# Altium schematic symbol library PCB_PTUMotorDriver.SCHLIB: 144 symbols (part 3 of 3)
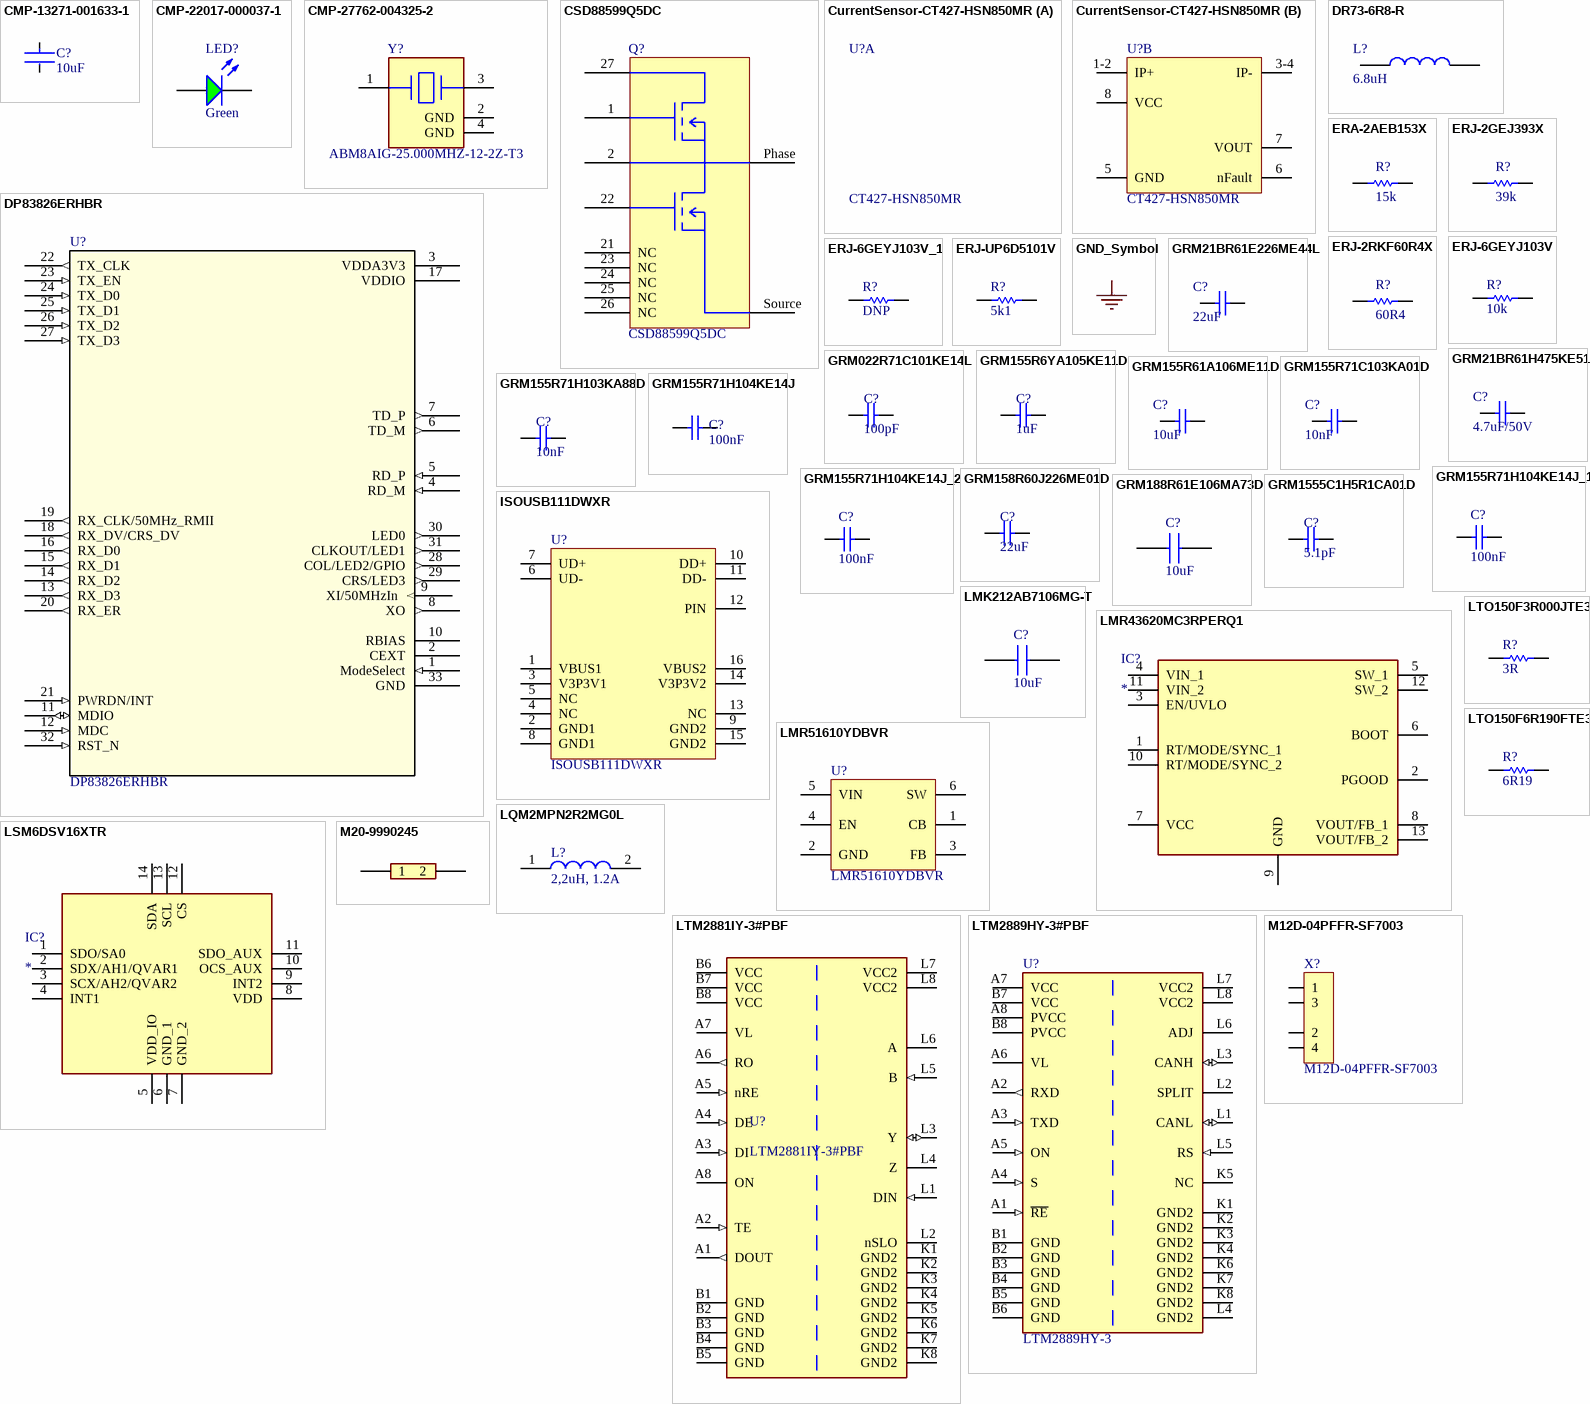
[diagram p5: symbols CMP-13271-001633-1 to M20-9990245]

## LTO150F3R000JTE3
designator R?, comment 3R
Resistor 3R Powerresistor; Manufacturer Part Number: 72-LTO150F3R000JTE3; Supplier 1: Mouser; Supplier 2: Digikey; Supplier Part Number 2: 716-LTO150F3R000JTE3-ND
footprint FP-LTO150-MFG
pins: 1, 2

## LTO150F6R190FTE3
designator R?, comment 6R19
Resistor 3R Powerresistor; Manufacturer Part Number: LTO150F6R190FTE3; Supplier 1: Avnet; Supplier Part Number 1: LTO150F6R190FTE3
footprint FP-LTO150-MFG
pins: 1, 2

## M12D-04PFFR-SF7003
designator X?
Conn Circular F 4 POS Solder RA Panel Mount 4 Terminal 1 Port; Manufacturer: Amphenol; Manufacturer Part Number: M12D-04PFFR-SF7003; RoHS: No; Pricing 1: 10=8.15600 (USD); ComponentLink1URL: http://www.amphenolltw.com/2012download/2D%20PDF/03_M%20Series%20Sensor%20Connectors/M12D-04PFFR-SF7003.pdf?src-supplier=Digi-Key; ComponentLink1Description: http://www.amphenolltw.com/2012download/2D%20PDF/03_M%20Series%20Sensor%20Connectors/M12D-04PFFR-SF7003.pdf?src-supplier=Digi-Key; Supplier 1: Digikey; Supplier Part Number 1: 4995-M12D-04PFFR-SF7003-ND
footprint M12D04PFFRSF7003
pins: 1, 2, 3, 4

## M20-9990245
designator J?  (value not drawn)
2x1 Connector Header; Manufacturer_Name: Harwin; Datasheet Link: https://cdn.harwin.com/pdfs/M20-999.pdf; Height: 8.64mm; Manufacturer Part Number: M20-9990245; Mouser Part Number: 855-M20-9990245; Mouser Price/Stock: https://www.mouser.co.uk/ProductDetail/Harwin/M20-9990245?qs=Jph8NoUxIfUDXEB%252Bi9kJRA%3D%3D; Supplier 1: Digikey; Supplier Part Number 1: 952-2261-ND
footprint HDRV2W64P0X254_1X2_508X254X864P
pins: 1, 2

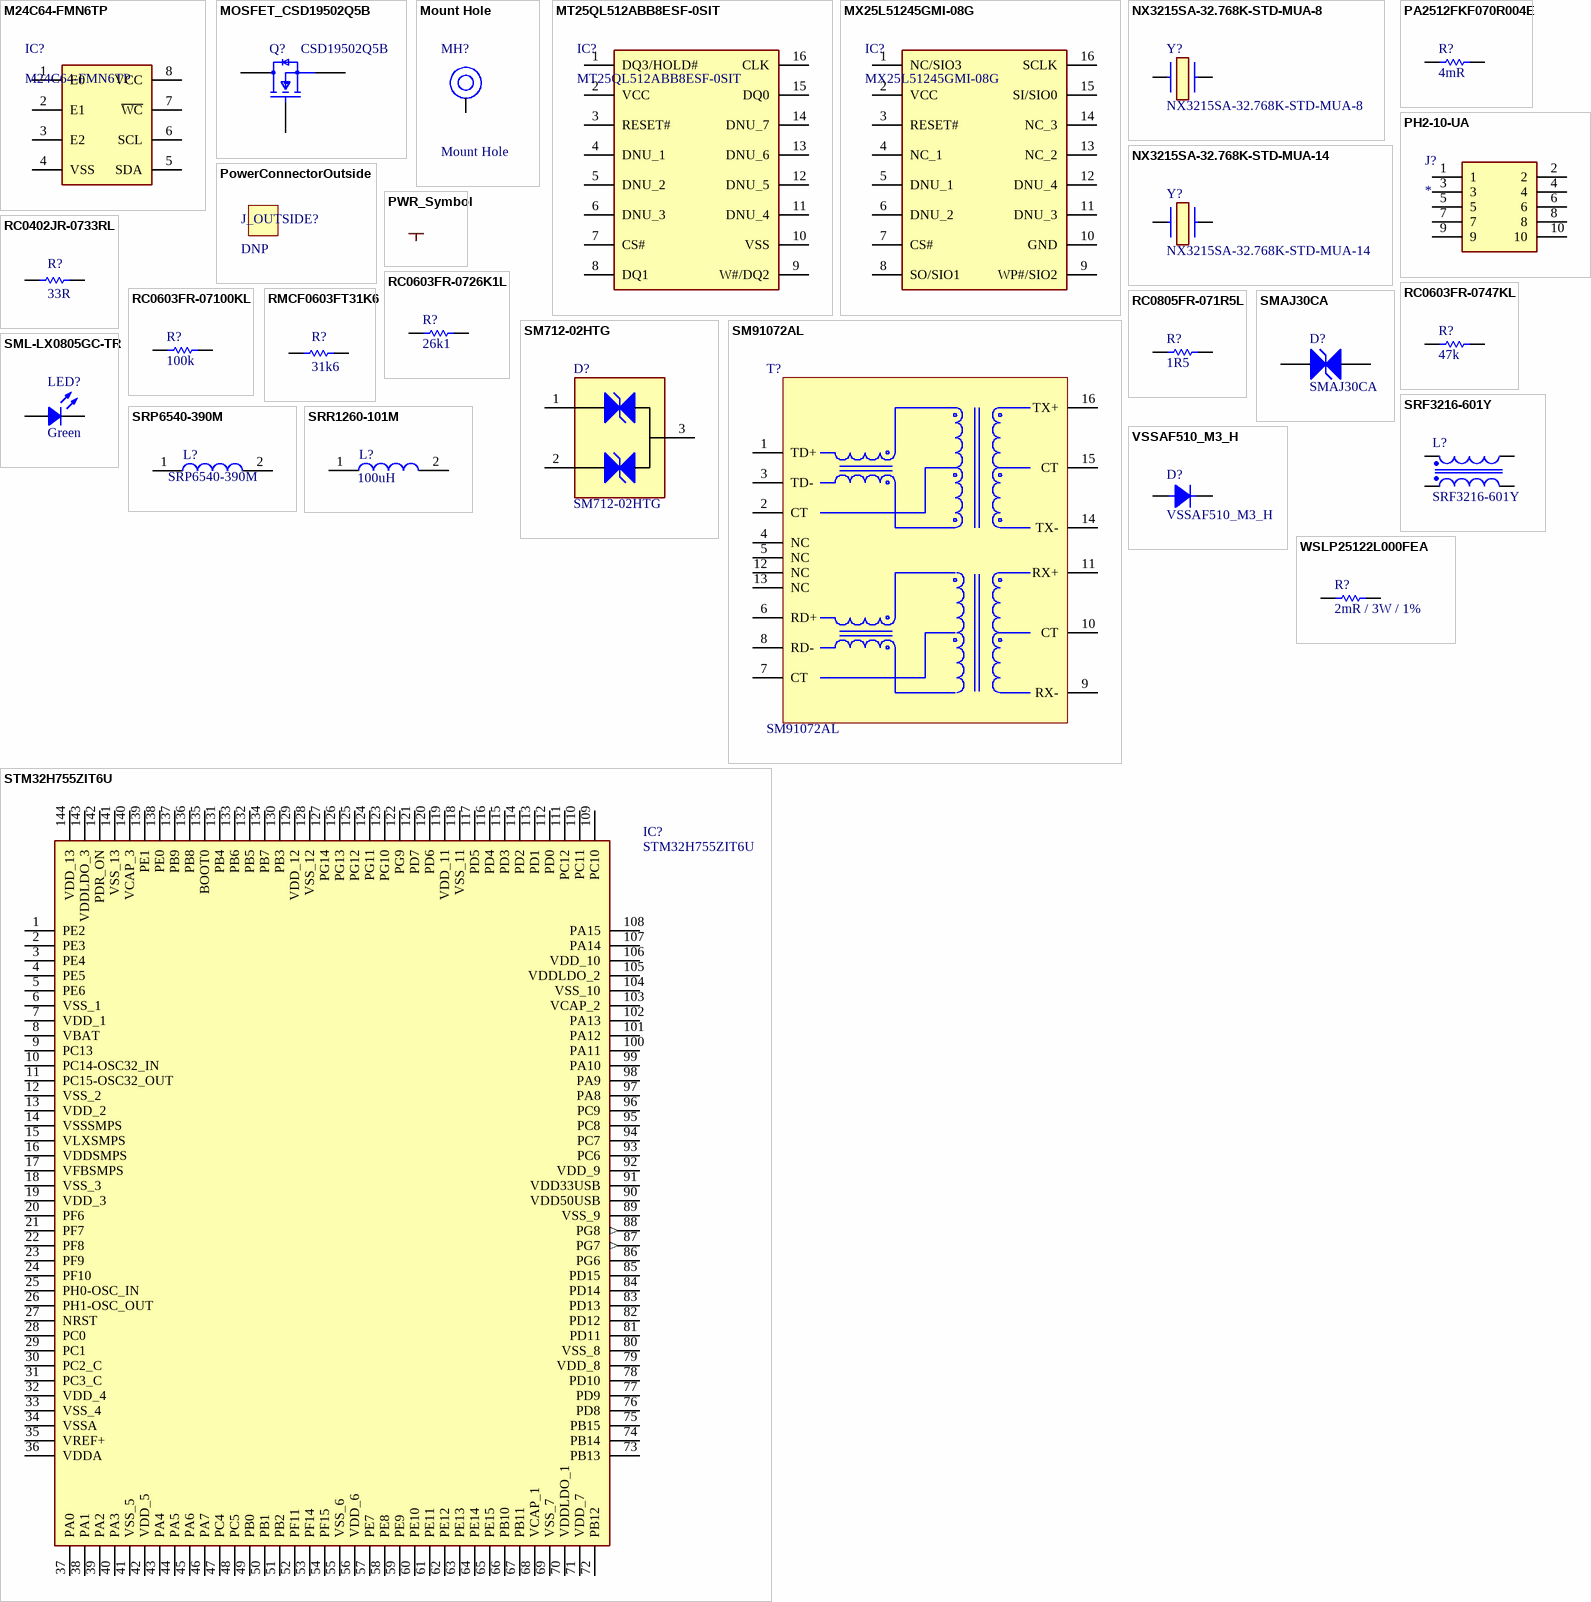
[diagram p3: symbols M24C64-FMN6TP to WSLP25122L000FEA]

## M24C64-FMN6TP
designator IC?
EEPROM ST 64kbit I2C; Manufacturer_Name: STMicroelectronics; Datasheet Link: https://www.st.com/resource/en/datasheet/m24c64-f.pdf; Height: 1.75mm; Manufacturer Part Number: M24C64-FMN6TP; Mouser Part Number: 511-M24C64-FMN6TP; Mouser Price/Stock: https://www.mouser.co.uk/ProductDetail/STMicroelectronics/M24C64-FMN6TP?qs=bKyP%252BnDORLFSmkTpM6wmYg%3D%3D; Arrow Part Number: M24C64-FMN6TP; Arrow Price/Stock: https://www.arrow.com/en/products/m24c64-fmn6tp/stmicroelectronics?utm_currency=USD&region=europe
footprint SOIC127P600X175-8N
pins: 1 E0, 2 E1, 3 E2, 4 VSS, 5 SDA, 6 SCL, 7 ~{WC}, 8 VCC

## MOSFET_CSD19502Q5B
designator Q?, comment CSD19502Q5B
MOSFET N-CH 80V 100A 8SON; Manufacturer Part Number: 595-CSD19502Q5B; Element Configuration: Single; Number of Channels: 1; Fall Time: 7ns; Threshold Voltage: 2.7V; Gate to Source Voltage (Vgs): 20V; Input Capacitance: 4.87nF; Drain to Source Resistance: 3.4mR; Turn-On Delay Time: 8ns; Power Dissipation: 3.2W; Rise Time: 6ns; Turn-Off Delay Time: 22ns; Rds On Max: 4.1mR; Number of Pins: 8; Min Operating Temperature: -55°C; Continuous Drain Current (ID): 100A; Number of Elements: 1; Max Operating Temperature: 150°C; Package Quantity: 2500; Packaging: Tape and Reel; Drain to Source Breakdown Voltage: 80V; RoHS Compliant: Yes; Mount: Surface Mount; Drain to Source Voltage (Vdss): 80V; REACH SVHC: No SVHC; Lead Free: Contains Lead; Max Power Dissipation: 3.2W; Supplier 1: Mouser
footprint FP-DNK0008A-MFG
pins: 1-2-3 S, 4 G, 5-6-7-8 D

## Mount Hole
designator MH?
M3 (3.5mm) hole
footprint MOUNT_HOLE
pins: 1

## MT25QL512ABB8ESF-0SIT
designator IC?
NOR FLASH 512Mbit QSPI; Manufacturer_Name: Micron; Datasheet Link: https://datasheet.datasheetarchive.com/originals/distributors/DKDS42/DSANUWW0045437.pdf; Height: 2.65mm; Manufacturer Part Number: MT25QL512ABB8ESF-0SIT; Mouser Part Number: 340-278183-TRAY; Mouser Price/Stock: https://www.mouser.co.uk/ProductDetail/Micron/MT25QL512ABB8ESF-0SIT?qs=rrS6PyfT74e8sADX0P8kAw%3D%3D; Arrow Part Number: MT25QL512ABB8ESF-0SIT; Arrow Price/Stock: https://www.arrow.com/en/products/mt25ql512abb8esf-0sit/micron-technology?utm_currency=USD&region=nac
footprint SOIC127P1032X265-16N
pins: 1 DQ3/HOLD#, 2 VCC, 3 RESET#, 4 DNU_1, 5 DNU_2, 6 DNU_3, 7 CS#, 8 DQ1, 9 W#/DQ2, 10 VSS, 11 DNU_4, 12 DNU_5, 13 DNU_6, 14 DNU_7, 15 DQ0, 16 CLK

## MX25L51245GMI-08G
designator IC?
NOR Flahs 512MBit QSPI Macronix; Datasheet Link: https://datasheet.datasheetarchive.com/originals/dk/DKDS-14/274585.pdf; Height: 2.65mm; Manufacturer_Name: Macronix; Manufacturer Part Number: MX25L51245GMI-08G; Arrow Part Number: MX25L51245GMI-08G; Arrow Price/Stock: https://www.arrow.com/en/products/mx25l51245gmi-08g/macronix-international?region=nac
footprint SOIC127P1030X265-16N
pins: 1 NC/SIO3, 2 VCC, 3 RESET#, 4 NC_1, 5 DNU_1, 6 DNU_2, 7 CS#, 8 SO/SIO1, 9 WP#/SIO2, 10 GND, 11 DNU_3, 12 DNU_4, 13 NC_2, 14 NC_3, 15 SI/SIO0, 16 SCLK

## NX3215SA-32.768K-STD-MUA-8
designator Y?
Crystal or Oscillator; Manufacturer_Name: NDK; Datasheet Link: https://www.arrow.com/en/products/nx3215sa32.768kstdmua8/ndk; Height: 0.9mm; Manufacturer Part Number: NX3215SA-32.768K-STD-MUA-8; Mouser Part Number: 344-NX3215SA32768K8; Mouser Price/Stock: https://www.mouser.co.uk/ProductDetail/NDK/NX3215SA-32.768K-STD-MUA-8?qs=55YtniHzbhBdnrw6egvs7Q%3D%3D; Arrow Part Number: NX3215SA-32.768K-STD-MUA-8; Arrow Price/Stock: https://www.arrow.com/en/products/nx3215sa32.768kstdmua8/ndk; Supplier 1: Mouser; Supplier Part Number 1: 344-NX3215SA32768K8
footprint NX3215SA32768KSTDMUA8
pins: 1, 2 CRYSTAL_2

## NX3215SA-32.768K-STD-MUA-14
designator Y?
Crystal or Oscillator - 6pF Load; Manufacturer_Name: NDK; Datasheet Link: https://www.arrow.com/en/products/nx3215sa32.768kstdmua8/ndk; Height: 0.9mm; Manufacturer Part Number: NX3215SA-32.768K-STD-MUA-14; Mouser Part Number: 344-NX3215SA32768K8; Mouser Price/Stock: https://www.mouser.co.uk/ProductDetail/NDK/NX3215SA-32.768K-STD-MUA-8?qs=55YtniHzbhBdnrw6egvs7Q%3D%3D; Arrow Part Number: NX3215SA-32.768K-STD-MUA-8; Arrow Price/Stock: https://www.arrow.com/en/products/nx3215sa32.768kstdmua8/ndk; Supplier 1: Mouser; Supplier Part Number 1: 344-NX3215SA32768K8
footprint NX3215SA32768KSTDMUA8
pins: 1, 2 CRYSTAL_2

## PA2512FKF070R004E
designator R?, comment 4mR
Resistor 4mR Measurement resistor; Manufacturer: Yageo; Manufacturer Part Number: PA2512FKF070R004E; Tolerance: 1%; Power: 1W; Rated Temperature: 70°C; Temperature Coefficient (ppm/Cel): 100; Package Height: 0.63mm; Package Length: 6.35mm; Package Width: 3.18mm; Reference Standard: AEC-Q200; Supplier: Digikey; Supplier Part Number: YAG2139CT-ND; RoHS: Yes; Category: Chip SMD Resistors; Stock: 13389; Pricing: 1=0.6, 10=0.387, 25=0.3288, 50=0.2926, 100=0.2616, 250=0.2276, 500=0.20634, 1000=0.18827 (USD); Mounting Technology: Surface Mount; Pins: 2; Package Shape: Rectangular; Case/Package: 2512; Terminal Finish: Nickel; Min Operating Temperature: -55°C; Max Operating Temperature: 170°C; JESD-609 Code: e3; Resistor Type: FIXED RESISTOR; Construction: Chip; Packaging: Tape and Reel; Value: 4mR; Technology: METAL ALLOY; Termination: Wraparound; Reach SVHC Compliant: Yes; RoHS Compliant: Yes; ComponentLink1URL: https://datasheet.ciiva.com:443/pdfs/VipMasterIC/IC/YAGO/YAGO-S-A0001793180/YAGO-S-A0001793180-1.pdf?src-supplier=IHS+Markit; ComponentLink1Description: https://datasheet.ciiva.com:443/pdfs/VipMasterIC/IC/YAGO/YAGO-S-A0001793180/YAGO-S-A0001793180-1.pdf?src-supplier=IHS+Markit; ComponentLink2URL: http://www.mouser.com/ds/2/447/PYu-PA_E_51_RoHS_5-1077983.pdf?src-supplier=Mouser; ComponentLink2Description: http://www.mouser.com/ds/2/447/PYu-PA_E_51_RoHS_5-1077983.pdf?src-supplier=Mouser; ComponentLink3URL: http://www.yageo.com/documents/recent/PYu-PA_E_51_RoHS_6.pdf?src-supplier=Digikey; ComponentLink3Description: http://www.yageo.com/documents/recent/PYu-PA_E_51_RoHS_6.pdf?src-supplier=Digikey; ComponentLink4URL: http://www.yageo.com/documents/recent/PYu-PA_E_51_RoHS_10.pdf?src-supplier=Digikey; ComponentLink4Description: http://www.yageo.com/documents/recent/PYu-PA_E_51_RoHS_10.pdf?src-supplier=Digikey; Supplier 1: Digikey; Supplier Part Number 1: YAG2139CT-ND
footprint RESC6331X88N
pins: 1, 2

## PH2-10-UA
designator J?
Connector 10pos; Manufacturer_Name: Adam Tech; Manufacturer Part Number: PH2-10-UA; Datasheet Link: https://datasheet.datasheetarchive.com/originals/distributors/Datasheets_SAMA/c63e3fe101e7b6e3957e7ad4a1a98367.pdf; Height: 9.516mm; Arrow Part Number: PH2-10-UA; Arrow Price/Stock: https://www.arrow.com/en/products/ph2-10-ua/adam-tech?utm_currency=USD&region=europe
footprint HDRV10W64P254_2X5_1270X500X952P
pins: 1, 2, 3, 4, 5, 6, 7, 8, 9, 10

## PowerConnectorOutside
designator J_OUTSIDE?, comment DNP
Waterresistant power connector e
footprint Powerconnector

## PWR_Symbol
designator *  (value not drawn)  (graphical)

## RC0402JR-0733RL
designator R?, comment 33R
Resistor 33R 0402; Manufacturer_Name: KEMET; Manufacturer Part Number: RC0402JR-0733RL; Datasheet Link: http://www.yageo.com/documents/recent/PYu-RC0402_51_RoHS_L_6_r.pdf; Height: 0.4mm; Mouser Part Number: 603-RC0402JR-0733RL; Mouser Price/Stock: https://www.mouser.com/Search/Refine.aspx?Keyword=603-RC0402JR-0733RL; Arrow Part Number: RC0402JR-0733RL; Arrow Price/Stock: https://www.arrow.com/en/products/rc0402jr-0733rl/yageo
footprint RESC1005X40N
pins: 1, 2

## RC0603FR-0726K1L
designator R?, comment 26k1
Resistor 26k1 0603; Mfr_Name: Yageo; Manufacturer Part Number: 603-RC0603FR-0726K1L; Supplier 1: Mouser
footprint RC0603N_YAG
pins: 1, 2

## RC0603FR-0747KL
designator R?, comment 47k
Resistor 47k 0603; Manufacturer_Name: KEMET; Manufacturer Part Number: RC0603FR-0747KL; Datasheet Link: http://www.yageo.com/documents/recent/PYu-RC0603_51_RoHS_L_v5.pdf; Height: 0.55mm; Mouser Part Number: 603-RC0603FR-0747KL; Mouser Price/Stock: https://www.mouser.co.uk/ProductDetail/YAGEO/RC0603FR-0747KL?qs=gt6vzsuosg3jXzmCiDCCdg%3D%3D; Arrow Part Number: RC0603FR-0747KL; Arrow Price/Stock: https://www.arrow.com/en/products/rc0603fr-0747kl/yageo?region=nac; Supplier 1: Digikey; Supplier Part Number 1: 311-47.0KHRCT-ND; Supplier 2: Digikey; Supplier Part Number 2: 311-47.0KHRDKR-ND
footprint RESC1608X55N
pins: 1, 2

## RC0603FR-07100KL
designator R?, comment 100k
Resistor 100k 0603; Manufacturer_Name: YAGEO; Manufacturer Part Number: RC0603FR-07100KL; Datasheet Link: https://www.yageo.com/upload/media/product/productsearch/datasheet/rchip/PYu-RC_Group_51_RoHS_L_12.pdf; Height: 0.55mm; Mouser Part Number: 603-RC0603FR-07100KL; Mouser Price/Stock: https://www.mouser.co.uk/ProductDetail/YAGEO/RC0603FR-07100KL?qs=e1ok2LiJcmaihem8Va5%2Fsw%3D%3D; Arrow Part Number: RC0603FR-07100KL; Arrow Price/Stock: https://www.arrow.com/en/products/rc0603fr-07100kl/yageo?utm_currency=USD&region=nac; Supplier 1: Digikey; Supplier Part Number 1: 311-100KHRCT-ND
footprint RESC1608X55N
pins: 1, 2

## RC0805FR-071R5L
designator R?, comment 1R5
Resistor 1R5 0805; Manufacturer_Name: KEMET; Manufacturer Part Number: RC0805FR-071R5L; Datasheet Link: http://www.yageo.com/documents/recent/PYu-RC_Group_51_RoHS_L_10.pdf; Height: 0.6mm; Mouser Part Number: 603-RC0805FR-071R5L; Mouser Price/Stock: https://www.mouser.com/Search/Refine.aspx?Keyword=603-RC0805FR-071R5L; Supplier 1: Digikey; Supplier Part Number 1: 311-1.50CRCT-ND
footprint RESC2012X60N
pins: 1, 2

## RMCF0603FT31K6
designator R?, comment 31k6
Resistor 31k6 0603; Manufacturer_Name: Stackpole Electronics; Manufacturer Part Number: RMCF0603FT31K6; Datasheet Link: https://www.seielect.com/Catalog/SEI-RMCF_RMCP.pdf; Height: 0.55mm; Arrow Part Number: RMCF0603FT31K6; Arrow Price/Stock: https://www.arrow.com/en/products/rmcf0603ft31k6/stackpole-electronics?region=nac
footprint RESC1608X55N
pins: 1, 2

## SM712-02HTG
designator D?
TVS Diode (Bi-directional); Manufacturer_Name: LITTELFUSE; Datasheet Link: https://www.littelfuse.com/media?resourcetype=datasheets&itemid=a4019802-ff62-41ff-bf66-295f97422f81&filename=littelfuse-tvs-diode-array-sm712-datasheet; Height: 1.12mm; Manufacturer Part Number: SM712-02HTG; Mouser Part Number: 576-SM712-02HTG; Mouser Price/Stock: https://www.mouser.co.uk/ProductDetail/Littelfuse/SM712-02HTG?qs=aGgfWYEhH7lQgBVBPCUDkw%3D%3D; Arrow Part Number: SM712-02HTG; Arrow Price/Stock: https://www.arrow.com/en/products/sm712-02htg/littelfuse?utm_currency=USD&region=nac; Supplier 1: Digikey; Supplier Part Number 1: F6450CT-ND
footprint SM71202HTG
pins: 1, 2, 3

## SM91072AL
designator T?
Telecom Transformer 1: 1 1.4Ohm Prim. DCR 1Ohm Sec. DCR 16 Terminal Gull Wing SMD Automotive; Manufacturer: Bourns; Value: 350uH; Turns Ratio: 1:1; ComponentLink1URL: http://www.farnell.com/datasheets/2169310.pdf?src-supplier=Farnell; ComponentLink1Description: http://www.farnell.com/datasheets/2169310.pdf?src-supplier=Farnell; ComponentLink2URL: https://www.bourns.com/docs/Product-Datasheets/sm13072apel.pdf?src-supplier=Digi-Key; ComponentLink2Description: https://www.bourns.com/docs/Product-Datasheets/sm13072apel.pdf?src-supplier=Digi-Key; ComponentLink3URL: http://www.farnell.com/datasheets/2169310.pdf?src-supplier=Newark; ComponentLink3Description: http://www.farnell.com/datasheets/2169310.pdf?src-supplier=Newark; Supplier: Digikey; Supplier Part Number: 118-SM91072AL-ECT-ND; Manufacturer Part Number: SM91072AL; RoHS: Yes; Category: Uncategorized; Stock: 2173; Pricing: 1=4.72, 10=3.828, 25=3.0952, 50=2.8998, 100=2.7695, 250=2.68808 (USD); Mounting Technology: Surface Mount; Min Operating Temperature: -40°C; Max Operating Temperature: 125°C; Series: Automotive, AEC-Q200, SM; Supplier 1: Digikey; Supplier Part Number 1: 118-SM91072AL-ECT-ND
footprint SOIC127P950X590-16N
pins: 1 TD+, 2 CT, 3 TD-, 4 NC, 5 NC, 6 RD+, 7 CT, 8 RD-, 9 RX-, 10 CT, 11 RX+, 12 NC, 13 NC, 14 TX-, 15 CT, 16 TX+

## SMAJ30CA
designator D?
LITTELFUSE - SMAJ30CA - TVS DIODE, 400W, 30V, DO-214AC; Manufacturer: Littelfuse Inc.; Clamping Voltage: 48.4V; Polarity: Bidirectional; Peak Pulse Current: 8.3A; Test Current: 1mA; Reverse Breakdown Voltage: 33.3V; Number of Elements: 1; Leakage Current: 1uA; Element Configuration: Single; Power Line Protection: No; Max Power Dissipation: 3.3W; Max Breakdown Voltage: 36.8V; Manufacturer Part Number: SMAJ30CA; Value: *; Supplier 1: Digi-Key; Stock 1: 28360; Pricing 1: 1=0.45000, 10=0.33900, 25=0.30520, 100=0.16100, 250=0.15928, 500=0.14264, 1000=0.11100, 2500=0.10156 (USD); RoHS: Yes; Mount: Surface Mount; Number of Pins: 2; Min Operating Temperature: -65°C; Max Operating Temperature: 150°C; Peak Pulse Power: 400W; Packaging: Tape and Reel; Reverse Standoff Voltage: 30V; Breakdown Voltage: 33.3V; Package Quantity: 5000; Max Surge Current: 8.3A; Operating Supply Voltage: 30V; Min Breakdown Voltage: 33.3V; Number of Channels: 1; Direction: Bidirectional; Termination: SMD/SMT; Max Reverse Leakage Current: 1uA; Number of Bidirectional Channels: 1; Composition: Zener; Power Dissipation: 400W; Voltage Rating (DC): 30V; Length: 4.5mm; Height: 2.087mm; Width: 2.79mm; Radiation Hardening: No; Lead Free: Lead Free; REACH SVHC: No SVHC; ComponentLink1URL: https://datasheet.ciiva.com/25624/0900766b810f4edb-25624835.pdf?src-supplier=RSComponents; ComponentLink1Description: https://datasheet.ciiva.com/25624/0900766b810f4edb-25624835.pdf?src-supplier=RSComponents; ComponentLink2URL: https://datasheet.ciiva.com/331/littelfuse-tvs-diode-smaj-datasheet-pdf-331093.pdf?src-supplier=Digi-Key; ComponentLink2Description: https://datasheet.ciiva.com/331/littelfuse-tvs-diode-smaj-datasheet-pdf-331093.pdf?src-supplier=Digi-Key; ComponentLink3URL: https://datasheet.ciiva.com/28473/607617-28473413.pdf?src-supplier=Element14; ComponentLink3Description: https://datasheet.ciiva.com/28473/607617-28473413.pdf?src-supplier=Element14; ComponentLink4URL: https://datasheet.ciiva.com/331/littelfuse-tvs-diode-smaj-datasheet-pdf-331094.pdf?src-supplier=Digi-Key; ComponentLink4Description: https://datasheet.ciiva.com/331/littelfuse-tvs-diode-smaj-datasheet-pdf-331094.pdf?src-supplier=Digi-Key; ComponentLink5URL: https://datasheet.ciiva.com/331/littelfuse-tvs-diode-smaj-datasheet-pdf-331095.pdf?src-supplier=Digi-Key; ComponentLink5Description: https://datasheet.ciiva.com/331/littelfuse-tvs-diode-smaj-datasheet-pdf-331095.pdf?src-supplier=Digi-Key; ComponentLink6URL: https://datasheet.ciiva.com/14162/smaj-eng-ds-14162037.pdf?src-supplier=Distrelec; ComponentLink6Description: https://datasheet.ciiva.com/14162/smaj-eng-ds-14162037.pdf?src-supplier=Distrelec; ComponentLink7URL: https://datasheet.ciiva.com/16487/littelfuse-tvs-diode-smaj-16487781.pdf?src-supplier=Future+Electronics; ComponentLink7Description: https://datasheet.ciiva.com/16487/littelfuse-tvs-diode-smaj-16487781.pdf?src-supplier=Future+Electronics; ComponentLink8URL: https://datasheet.ciiva.com/8062/littelfuse-tvs-diode-smaj-8062300.pdf?src-supplier=Element14; ComponentLink8Description: https://datasheet.ciiva.com/8062/littelfuse-tvs-diode-smaj-8062300.pdf?src-supplier=Element14; Supplier Part Number 1: SMAJ30CALFCT-ND
footprint DO-214AC-M (DO-214AC-Medium density)
pins: 1, 2

## SML-LX0805GC-TR
designator LED?, comment Green
LED GREEN CLEAR SMD; Manufacturer: Lumex Opto/Components Inc.; Manufacturer Part Number: SML-LX0805GC-TR; Configuration: Standard; Current - Test: 20mA; Lens Color: Colorless; Lens Size: 1.40mm x 1.25mm; Lens Style: Rectangle with Flat Top; Millicandela Rating: 10mcd; Viewing Angle: 140°; Voltage - Forward (Vf) (Typ): 2.2V; Wavelength - Peak: 565nm; Color: Green; ComponentLink1Description: Datasheet; ComponentLink1URL: https://www.lumex.com/content/files/ProductAttachment/SML-LX0805GC-TR.pdf; ComponentLink2Description: DigiKey Link; ComponentLink2URL: https://www.digikey.com/en/products/detail/lumex-opto-components-inc/SML-LX0805GC-TR/515786; Device Package: 0805 (2012 Metric); Height (Max): 1.20mm; LastUpdated: 11/03/2024 07:52:46; Lens Transparency: Clear; Lifecycle Status: Active; Minimum Order: 1; Mounting Type: Surface Mount; Package / Case: 0805 (2012 Metric); Packaging: TapeAndReel; PartId: 242; Part Status: Active; Price: 0.05; Series: -; Size / Dimension: 2.00mm L x 1.25mm W; Supplier 1: DigiKey; Supplier Part Number 1: 67-2188-1-ND; Value: Green
footprint LED 0805_2012 GREEN (Chip Diode, 2-Leads, Body 2.00x1.25mm, IPC Medium Density)
pins: 1, 2

## SRF3216-601Y
designator L?
BOURNS - SRF3216A-601Y - FILTER, COMMON MODE, 600R, 0.3A, SMD; Number of Lines: 2; Max Current Rating: 300mA; DC Resistance (DCR): 800mR; Voltage Rating (DC): 50V; Manufacturer: Bourns; Manufacturer Part Number: SRF3216-601Y; Supplier 1: Digi-Key; Stock 1: 1132; Pricing 1: 1=0.78, 10=0.684, 100=0.4888, 500=0.41056, 1000=0.33235 (USD); Mount: Surface Mount; Min Operating Temperature: -40°C; Max Operating Temperature: 125°C; Resistance: 600R; Package Quantity: 2000; Packaging: Tape and Reel; Impedance: 600R; Current Rating: 300mA; Length: 0.126inch; Height: 0.087inch; Width: 0.063inch; REACH SVHC: No SVHC; ComponentLink1URL: http://www.farnell.com/datasheets/2360565.pdf?src-supplier=Farnell; ComponentLink1Description: http://www.farnell.com/datasheets/2360565.pdf?src-supplier=Farnell; ComponentLink2URL: https://media.digikey.com/pdf/Data%20Sheets/Bourns%20PDFs/SRF3216A_Series_DS.pdf?src-supplier=Digi-Key; ComponentLink2Description: https://media.digikey.com/pdf/Data%20Sheets/Bourns%20PDFs/SRF3216A_Series_DS.pdf?src-supplier=Digi-Key; ComponentLink3URL: http://www.farnell.com/datasheets/1955469.pdf?src-supplier=Element14; ComponentLink3Description: http://www.farnell.com/datasheets/1955469.pdf?src-supplier=Element14; Supplier Part Number 1: SRF3216A-601YDKR-ND; Min Operating Temperature: -55°C
footprint SRF3216A (Common Mode Chip Inductors)
pins: 1, 2, 3, 4

## SRP6540-390M
designator L?
Inductor Power Shielded/Molded Wirewound 39uH 20% 100KHz Powdered Iron 1.8A 0.322Ohm DCR T/R; Manufacturer: Bourns; ComponentLink1URL: https://datasheet.ciiva.com/22667/1698468-22667152.pdf?src-supplier=Element14; ComponentLink1Description: https://datasheet.ciiva.com/22667/1698468-22667152.pdf?src-supplier=Element14; Value: 39uH; Supplier: Digikey; Supplier Part Number: SRP6540-390MDKR-ND; Manufacturer Part Number: SRP6540-390M; RoHS: Yes; Category: Fixed Inductors; Stock: 3209; Pricing: 1=1.09, 10=0.93, 25=0.8568, 50=0.7656, 100=0.6419 (USD); ComponentLink2URL: https://datasheet.ciiva.com/28679/1698468-28679581.pdf?src-supplier=Element14; ComponentLink2Description: https://datasheet.ciiva.com/28679/1698468-28679581.pdf?src-supplier=Element14; ComponentLink3URL: https://datasheet.ciiva.com/22667/1698468-22667150.pdf?src-supplier=Element14; ComponentLink3Description: https://datasheet.ciiva.com/22667/1698468-22667150.pdf?src-supplier=Element14; ComponentLink4URL: https://datasheet.ciiva.com/15027/srp6540-15027231.pdf?src-supplier=Digikey; ComponentLink4Description: https://datasheet.ciiva.com/15027/srp6540-15027231.pdf?src-supplier=Digikey; Supplier 1: Digikey; Supplier Part Number 1: SRP6540-390MCT-ND
footprint FP-SRP6540-MFG
pins: 1, 2

## SRR1260-101M
designator L?, comment 100uH
Inductor; Manufacturer_Name: Bourns; Manufacturer Part Number: SRR1260-101M; Datasheet Link: https://componentsearchengine.com/Datasheets/1/SRR1260-101M.pdf; Height: 6.5mm; Mouser Part Number: 652-SRR1260-101M; Mouser Price/Stock: https://www.mouser.co.uk/ProductDetail/Bourns/SRR1260-101M?qs=uD%2FoUDWqfvQozr%2Ff4%252BPuSQ%3D%3D; Arrow Part Number: SRR1260-101M; Arrow Price/Stock: https://www.arrow.com/en/products/srr1260-101m/bourns?utm_currency=USD&region=nac; Supplier 1: Mouser; Supplier Part Number 1: 652-SRR1260-101M; Value: 100uH
footprint SRR1260101M
pins: 1, 2

## STM32H755ZIT6U
designator IC?
STM32H755 MCU; Manufacturer_Name: STMicroelectronics; Datasheet Link: https://www.st.com/resource/en/datasheet/stm32h755zi.pdf; Height: 1.6mm; Manufacturer Part Number: STM32H755ZIT6U; Mouser Part Number: 511-STM32H755ZIT6U; Mouser Price/Stock: https://www.mouser.com/Search/Refine.aspx?Keyword=511-STM32H755ZIT6U; Supplier 1: Heisener; Supplier Part Number 1: STM32H755ZIT6U
footprint QFP50P2200X2200X160-144N
pins: 1 PE2, 2 PE3, 3 PE4, 4 PE5, 5 PE6, 6 VSS_1, 7 VDD_1, 8 VBAT, 9 PC13, 10 PC14-OSC32_IN, 11 PC15-OSC32_OUT, 12 VSS_2, 13 VDD_2, 14 VSSSMPS, 15 VLXSMPS, 16 VDDSMPS, 17 VFBSMPS, 18 VSS_3, 19 VDD_3, 20 PF6, 21 PF7, 22 PF8, 23 PF9, 24 PF10, 25 PH0-OSC_IN, 26 PH1-OSC_OUT, 27 NRST, 28 PC0, 29 PC1, 30 PC2_C, 31 PC3_C, 32 VDD_4, 33 VSS_4, 34 VSSA, 35 VREF+, 36 VDDA, 37 PA0, 38 PA1, 39 PA2, 40 PA3, 41 VSS_5, 42 VDD_5, 43 PA4, 44 PA5, 45 PA6, 46 PA7, 47 PC4, 48 PC5, 49 PB0, 50 PB1, 51 PB2, 52 PF11, 53 PF14, 54 PF15, 55 VSS_6, 56 VDD_6, 57 PE7, 58 PE8, 59 PE9, 60 PE10, 61 PE11, 62 PE12, 63 PE13, 64 PE14, 65 PE15, 66 PB10, 67 PB11, 68 VCAP_1, 69 VSS_7, 70 VDDLDO_1, 71 VDD_7, 72 PB12, 73 PB13, 74 PB14, 75 PB15, 76 PD8, 77 PD9, 78 PD10, 79 VDD_8, 80 VSS_8, 81 PD11, 82 PD12, 83 PD13, 84 PD14, 85 PD15, 86 PG6, 87 PG7 (out), 88 PG8 (out), 89 VSS_9, 90 VDD50USB, 91 VDD33USB, 92 VDD_9, 93 PC6, 94 PC7, 95 PC8, 96 PC9, 97 PA8, 98 PA9, 99 PA10, 100 PA11, 101 PA12, 102 PA13, 103 VCAP_2, 104 VSS_10, 105 VDDLDO_2, 106 VDD_10, 107 PA14, 108 PA15, 109 PC10, 110 PC11, 111 PC12, 112 PD0, 113 PD1, 114 PD2, 115 PD3, 116 PD4, 117 PD5, 118 VSS_11, 119 VDD_11, 120 PD6, 121 PD7, 122 PG9, 123 PG10, 124 PG11, 125 PG12, 126 PG13, 127 PG14, 128 VSS_12, 129 VDD_12, 130 PB3, 131 PB4, 132 PB5, 133 PB6, 134 PB7, 135 BOOT0, 136 PB8, 137 PB9, 138 PE0, 139 PE1, 140 VCAP_3, 141 VSS_13, 142 PDR_ON, 143 VDDLDO_3, 144 VDD_13

## VSSAF510_M3_H
designator D?
Rectifier Diode; Manufacturer Part Number: VSSAF510-M3/HGICT-ND; Supplier 1: Mouser; Supplier Part Number 1: 78-VSSAF510-M3/H
footprint CR_SLIMSMA_DO-221AC_VIS-L
pins: 1 CATHODE, 2 ANODE

## WSLP25122L000FEA
designator R?, comment 2mR / 3W / 1%
Resistor 2mR measurement resistor; Manufacturer: Vishay Dale; Manufacturer Part Number: WSLP25122L000FEA; Rated Temperature: 70°C; Temperature Coefficient (ppm/Cel): 275; Package Height: 0.635mm; Package Length: 6.35mm; Package Width: 3.18mm; Reference Standard: AEC-Q200; Supplier: Mouser; Supplier Part Number: 71-WSLP25122L000FEA; RoHS: Yes; Category: Chip SMD Resistors; Stock: 374778; Pricing: 1=1.28, 10=0.737, 50=0.6, 100=0.449, 1000=0.308, 10000=0.27 (USD); Mounting Technology: Surface Mount; Pins: 2; Package Shape: Rectangular; Case/Package: 2512; Terminal Finish: Nickel; Min Operating Temperature: -65°C; Max Operating Temperature: 170°C; Tolerance: 1%; JESD-609 Code: e3; Resistor Type: FIXED RESISTOR; Construction: Chip; Packaging: Tape and Reel; Power: 3W; Value: 2mR; Technology: METAL STRIP; Termination: Wraparound; Reach SVHC Compliant: Yes; RoHS Compliant: Yes; ComponentLink1URL: https://datasheet.ciiva.com:443/pdfs/VipMasterIC/IC/VISH/VISH-S-A0009590861/VISH-S-A0009590861-1.pdf?src-supplier=IHS+Markit; ComponentLink1Description: https://datasheet.ciiva.com:443/pdfs/VipMasterIC/IC/VISH/VISH-S-A0009590861/VISH-S-A0009590861-1.pdf?src-supplier=IHS+Markit; ComponentLink2URL: https://datasheet.ciiva.com/48527/wslp-48527354.pdf?src-supplier=Avnet; ComponentLink2Description: https://datasheet.ciiva.com/48527/wslp-48527354.pdf?src-supplier=Avnet; Supplier 1: Mouser; Supplier Part Number 1: 71-WSLP25122L000FEA
footprint FP-WSLP2512-0R001-0R0049-IPC_B
pins: 1, 2